# Altium footprint library Master.PcbLib: 178 footprints (part 4 of 12)
Each footprint in its own frame and in the unit in brackets; x right, y up, seen from the top. Pads: shape width x height; smd on the part's side, far side on the other; paste and mask are expansions set on the pad; w line width, h text height; cw(c..) or ccw(c..) is an arc to the next point about the centre after c.
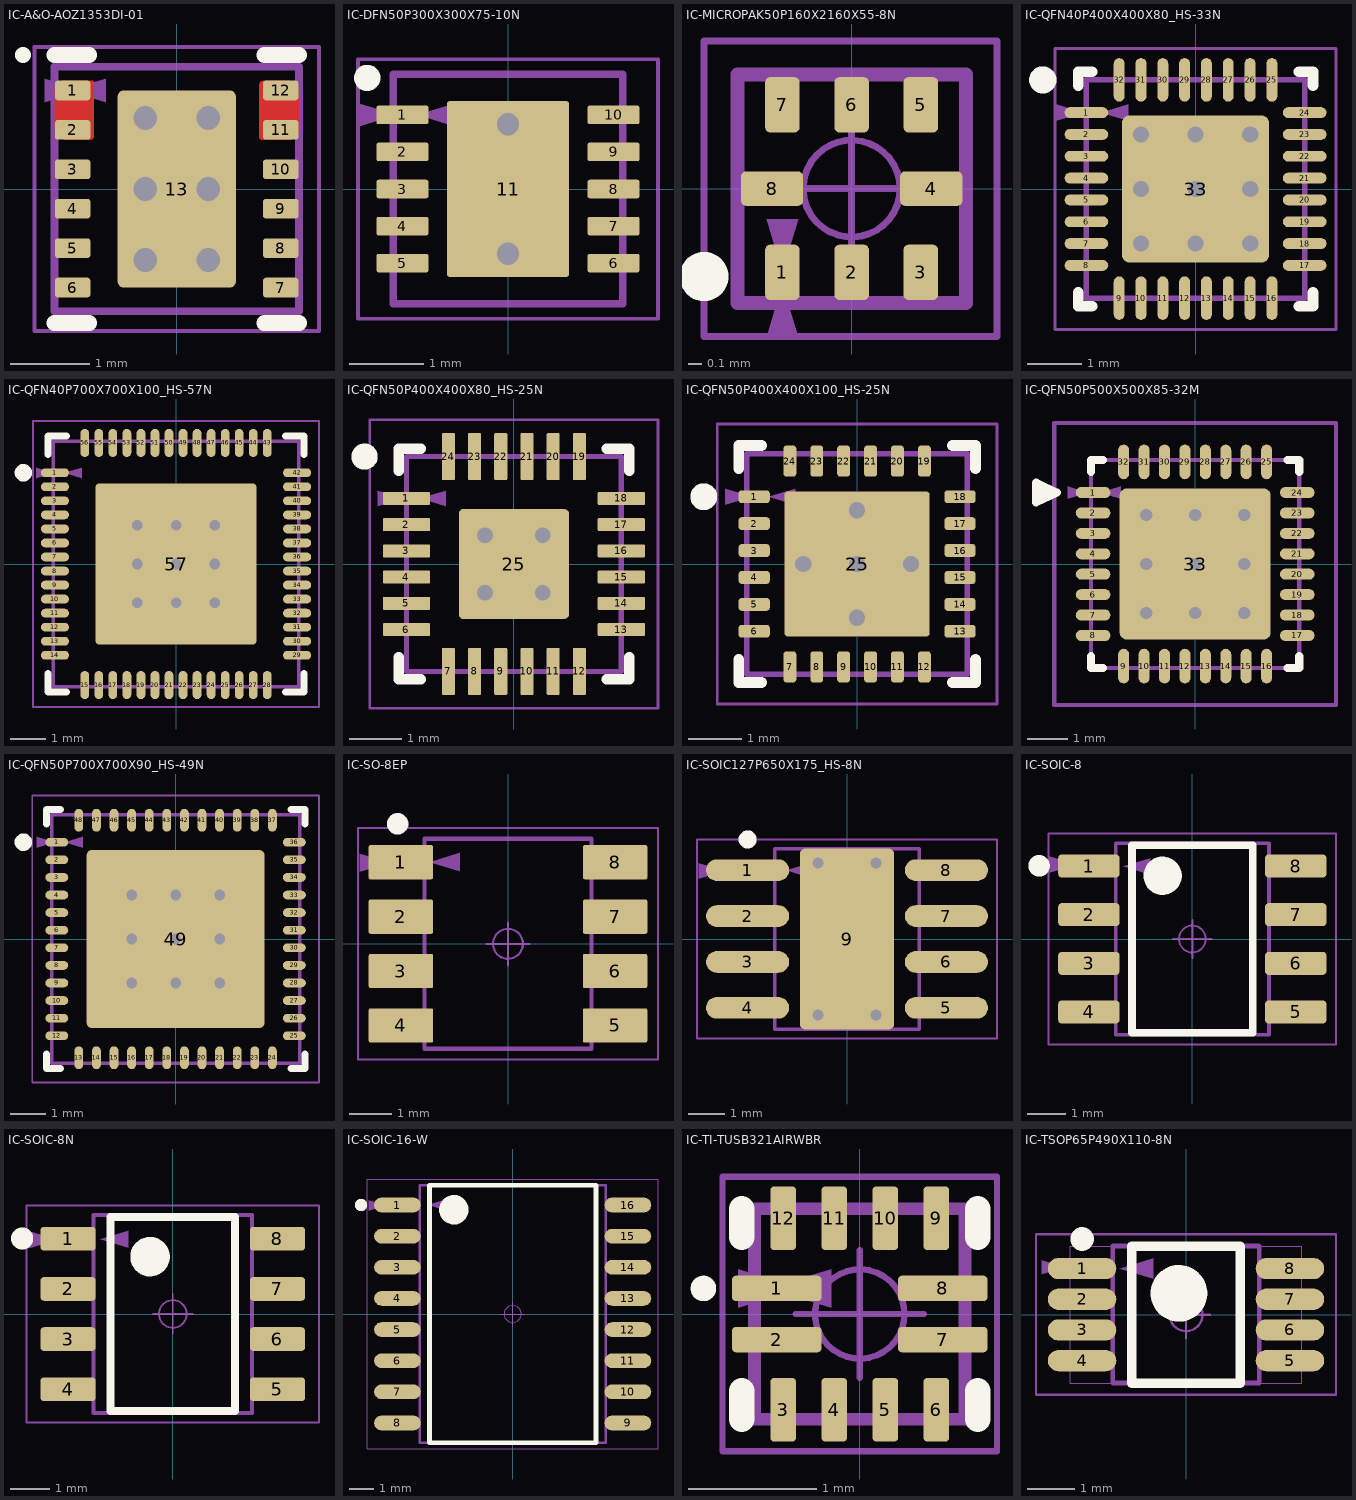
[diagram p3: the footprints below, top view; thin cyan lines are the x and y axes]

## IC-A&O-AOZ1353DI-01 [mm] "PSON, 12-Leads, Body 3.00x3.00mm, Pitch 0.50mm, Thermal Pad 2.50x1.50mm, IPC Medium Density"
height 1
pads (13):
  rrect30% 0.45x0.25 smd mask+0.05: 1(-1.32,1.25) 2(-1.32,0.75) 3(-1.32,0.25) 4(-1.32,-0.25) 5(-1.32,-0.75) 6(-1.32,-1.25) 7(1.32,-1.25) 8(1.32,-0.75) 9(1.32,-0.25) 10(1.32,0.25) 11(1.32,0.75) 12(1.32,1.25)
  rrect10% 1.5x2.5 smd paste-0.75 mask+0.05: 13(0,0)
via 0.4,-0.9 diameter 0.6 hole 0.3
via -0.4,-0.9 diameter 0.6 hole 0.3
via 0.4,0 diameter 0.6 hole 0.3
via -0.4,0 diameter 0.6 hole 0.3
via 0.4,0.9 diameter 0.6 hole 0.3
via -0.4,0.9 diameter 0.6 hole 0.3
Top Layer:
  region: -1.075,1.375 -1.07,1.375 -1.061,1.371 -1.054,1.364 -1.05,1.355 -1.05,1.35 -1.05,0.675 -1.05,0.665 -1.058,0.647 -1.072,0.633 -1.09,0.625 -1.1,0.625 -1.425,0.625 -1.545,0.745 -1.545,1.28 -1.45,1.375
  region: 1.075,0.625 1.07,0.625 1.061,0.629 1.054,0.636 1.05,0.645 1.05,0.65 1.05,1.325 1.05,1.335 1.058,1.353 1.072,1.367 1.09,1.375 1.1,1.375 1.425,1.375 1.545,1.255 1.545,0.72 1.45,0.625
Top Overlay:
  circle w0.1: c-1.95,1.7 r0.05
  lines w0.2: -1.55,-1.7 -1.11,-1.7 ; -1.55,1.7 -1.11,1.7 ; 1.11,-1.7 1.55,-1.7 ; 1.11,1.7 1.55,1.7
Top Paste:
  region: 0.11,0.075 0.126,0.122 0.18,0.204 0.258,0.264 0.351,0.296 0.4,0.3 0.55,0.3 0.55,0.6 0.4,0.6 0.341,0.606 0.233,0.651 0.151,0.733 0.106,0.841 0.1,0.9 0.1,1.05 -0.1,1.05 -0.1,0.9 -0.106,0.841 -0.151,0.733 -0.233,0.651 -0.341,0.606 -0.4,0.6 -0.55,0.6 -0.55,0.3 -0.4,0.3 -0.351,0.296 -0.258,0.264 -0.18,0.204 -0.126,0.122 -0.11,0.075
  region: -0.11,-0.075 -0.126,-0.122 -0.18,-0.204 -0.258,-0.264 -0.351,-0.296 -0.4,-0.3 -0.55,-0.3 -0.55,-0.6 -0.4,-0.6 -0.341,-0.606 -0.233,-0.651 -0.151,-0.733 -0.106,-0.841 -0.1,-0.9 -0.1,-1.05 0.1,-1.05 0.1,-0.9 0.106,-0.841 0.151,-0.733 0.233,-0.651 0.341,-0.606 0.4,-0.6 0.55,-0.6 0.55,-0.3 0.4,-0.3 0.351,-0.296 0.258,-0.264 0.18,-0.204 0.126,-0.122 0.11,-0.075
Top Solder:
  region: 1.595,1.246 1.595,0.674 1.505,0.674 1.406,0.575 1.074,0.575 1.059,0.575 1.032,0.586 1.01,0.607 0.999,0.635 0.999,0.65 0.999,1.325 1,1.346 1.017,1.384 1.048,1.412 1.087,1.426 1.108,1.425 1.416,1.425
  region: -1.595,0.754 -1.595,1.326 -1.505,1.326 -1.406,1.425 -1.074,1.425 -1.059,1.425 -1.031,1.414 -1.01,1.393 -0.999,1.365 -0.999,1.35 -0.999,0.675 -1,0.654 -1.017,0.616 -1.048,0.588 -1.087,0.574 -1.108,0.575 -1.416,0.575
Top Component Outline:
  region: -1.675,1.1 -1.175,1.25 -1.675,1.4
  lines w0.05: -1.805,-1.8 1.805,-1.8 1.805,1.8 -1.805,1.8 -1.805,-1.8
Top 3D Body:
  lines w0.001: -1.551,-1.55 -1.551,1.55 1.551,1.55 1.551,-1.55 -1.551,-1.55
Top Component Center:
  circle w0.05: c0,0 r0.35
  lines w0.05: -0.5,0 0.5,0 ; 0,-0.5 0,0.5
Top Dimensions:
  region: -0.9,1.4 -1.4,1.25 -0.9,1.1
  lines w0.1: -1.55,-1.55 -1.55,1.55 1.55,1.55 1.55,-1.55 -1.55,-1.55
Top Assembly:
  text ".Designator" at -0.5,-0.2 h0.75
3D body "PSON50P300X100_HS-13N.step": height 1, standoff 0, extent -1.551,-1.55 1.551,1.55

## IC-DFN50P300X300X75-10N [mm]
pads (11):
  rrect20% 0.7x0.25 smd: 1(-1.425,1) 2(-1.425,0.5) 3(-1.425,0) 4(-1.425,-0.5) 5(-1.425,-1) 6(1.425,-1) 7(1.425,-0.5) 8(1.425,0) 9(1.425,0.5) 10(1.425,1)
  rrect5% 1.65x2.38 smd paste-2.38: 11(0,0)
via 0,0.875 diameter 0.6 hole 0.3
via 0,-0.875 diameter 0.6 hole 0.3
Top Overlay:
  circle w0.254: c-1.9,1.5 r0.05
Top Paste:
  region: -0.8,0.5 -0.8,0.52 -0.785,0.557 -0.757,0.585 -0.72,0.6 -0.7,0.6 0.7,0.6 0.72,0.6 0.757,0.585 0.785,0.557 0.8,0.52 0.8,0.5 0.8,-0.5 0.8,-0.52 0.785,-0.557 0.757,-0.585 0.72,-0.6 0.7,-0.6 -0.699,-0.6 -0.719,-0.6 -0.756,-0.585 -0.785,-0.557 -0.8,-0.52 -0.8,-0.5
Top Component Outline:
  region: -2,0.85 -1.5,1 -2,1.15
  lines w0.05: -2.025,-1.75 -2.025,1.75 2.025,1.75 2.025,-1.75 -2.025,-1.75
Top 3D Body:
  lines w0.001: -1.551,-1.55 -1.551,1.55 1.551,1.55 1.551,-1.55 -1.551,-1.55
Top Component Center:
  circle w0.05: c0,0 r0.35
  lines w0.05: -0.5,0 0.5,0 ; 0,-0.5 0,0.5
Top Dimensions:
  region: -0.725,1.15 -1.225,1 -0.725,0.85
  lines w0.1: -1.55,-1.55 -1.55,1.55 1.55,1.55 1.55,-1.55 -1.55,-1.55
Top Assembly:
  text ".Designator" at -1.5,2 h0.75
3D body "Test-2.step": height 0.85, standoff 0, extent -1.551,-1.55 1.551,1.55

## IC-MICROPAK50P160X2160X55-8N [mm]
pads (8):
  rrect30% 0.25x0.4 smd: 1(-0.5,-0.605) 2(0,-0.605) 3(0.5,-0.605) 5(0.5,0.605) 6(0,0.605) 7(-0.5,0.605)
  rrect30% 0.45x0.25 smd: 4(0.575,0) 8(-0.575,0)
Top Overlay:
  circle w0.254: c-1.067,-0.635 r0.05
Top Component Outline:
  region: -0.387,-1.073 -0.5,-0.695 -0.613,-1.073
  lines w0.05: -1.067,-1.067 -1.067,1.067 1.05,1.067 1.05,-1.067 -1.067,-1.067
Top 3D Body:
  lines w0.001: -0.825,-0.825 -0.825,0.825 0.825,0.825 0.825,-0.825 -0.825,-0.825
Top Component Center:
  circle w0.05: c0,0 r0.35
  lines w0.05: -0.5,0 0.5,0 ; 0,-0.5 0,0.5
Top Dimensions:
  region: -0.613,-0.222 -0.5,-0.6 -0.387,-0.222
  lines w0.1: -0.825,-0.825 -0.825,0.825 0.825,0.825 0.825,-0.825 -0.825,-0.825
Top Assembly:
  text ".Designator" at -1.7,1.9 h0.75
3D body "PQFN50P160X160X55_HS-9N.step": height 0.55, standoff 0, extent -0.825,-0.825 0.825,0.825

## IC-QFN40P400X400X80_HS-33N [mm]
pads (33):
  oval 0.8x0.2 smd: 1(-2,1.4) 2(-2,1) 3(-2,0.6) 4(-2,0.2) 5(-2,-0.2) 6(-2,-0.6) 7(-2,-1) 8(-2,-1.4) 17(2,-1.4) 18(2,-1) 19(2,-0.6) 20(2,-0.2) 21(2,0.2) 22(2,0.6) 23(2,1) 24(2,1.4)
  oval 0.2x0.8 smd: 9(-1.4,-2) 10(-1,-2) 11(-0.6,-2) 12(-0.2,-2) 13(0.2,-2) 14(0.6,-2) 15(1,-2) 16(1.4,-2) 25(1.4,2) 26(1,2) 27(0.6,2) 28(0.2,2) 29(-0.2,2) 30(-0.6,2) 31(-1,2) 32(-1.4,2)
  rrect10% 2.7x2.7 smd paste-5: 33(0,0)
via 0,-1 diameter 0.6 hole 0.3
via -1,-1 diameter 0.6 hole 0.3
via 1,-1 diameter 0.6 hole 0.3
via 0,0 diameter 0.6 hole 0.3
via -1,0 diameter 0.6 hole 0.3
via 1,0 diameter 0.6 hole 0.3
via 1,1 diameter 0.6 hole 0.3
via -1,1 diameter 0.6 hole 0.3
via 0,1 diameter 0.6 hole 0.3
Top Overlay:
  circle w0.25: c-2.8,2 r0.125
  lines w0.2: -2.15,-1.9 -2.15,-2.15 -1.9,-2.15 ; -2.15,1.9 -2.15,2.15 -1.9,2.15 ; 1.9,-2.15 2.15,-2.15 2.15,-1.9 ; 1.9,2.15 2.15,2.15 2.15,1.9
Top Paste:
  region: 0.7,1 0.706,0.941 0.751,0.833 0.833,0.751 0.941,0.706 1,0.7 1.25,0.7 1.25,0.3 1,0.3 0.961,0.297 0.885,0.277 0.817,0.238 0.762,0.183 0.74,0.15 0.26,0.15 0.249,0.167 0.226,0.198 0.198,0.226 0.167,0.249 0.15,0.26 0.15,0.74 0.183,0.762 0.238,0.817 0.277,0.885 0.297,0.961 0.3,1 0.3,1.25 0.7,1.25
  region: 1,-0.7 0.941,-0.706 0.833,-0.751 0.751,-0.833 0.706,-0.941 0.7,-1 0.7,-1.25 0.3,-1.25 0.3,-1 0.297,-0.961 0.277,-0.885 0.238,-0.817 0.183,-0.762 0.15,-0.74 0.15,-0.26 0.167,-0.249 0.198,-0.226 0.226,-0.198 0.249,-0.167 0.26,-0.15 0.74,-0.15 0.762,-0.183 0.817,-0.238 0.885,-0.277 0.961,-0.297 1,-0.3 1.25,-0.3 1.25,-0.7
  region: -0.7,-1 -0.706,-0.941 -0.751,-0.833 -0.833,-0.751 -0.941,-0.706 -1,-0.7 -1.25,-0.7 -1.25,-0.3 -1,-0.3 -0.961,-0.297 -0.885,-0.277 -0.817,-0.238 -0.762,-0.183 -0.74,-0.15 -0.26,-0.15 -0.249,-0.167 -0.226,-0.198 -0.198,-0.226 -0.167,-0.249 -0.15,-0.26 -0.15,-0.74 -0.183,-0.762 -0.238,-0.817 -0.277,-0.885 -0.297,-0.961 -0.3,-1 -0.3,-1.25 -0.7,-1.25
  region: -1,0.7 -0.941,0.706 -0.833,0.751 -0.751,0.833 -0.706,0.941 -0.7,1 -0.7,1.25 -0.3,1.25 -0.3,1 -0.297,0.961 -0.277,0.885 -0.238,0.817 -0.183,0.762 -0.15,0.74 -0.15,0.26 -0.167,0.249 -0.198,0.226 -0.226,0.198 -0.249,0.167 -0.26,0.15 -0.74,0.15 -0.762,0.183 -0.817,0.238 -0.885,0.277 -0.961,0.297 -1,0.3 -1.25,0.3 -1.25,0.7
Top Component Outline:
  region: -2.55,1.25 -2.05,1.4 -2.55,1.55
  lines w0.05: -2.575,-2.575 -2.575,2.575 2.575,2.575 2.575,-2.575 -2.575,-2.575
  lines w0.1: -0.5,0 0.5,0 ; 0,-0.5 0,0.5
Top 3D Body:
  lines w0.001: -2,-2 -2,2 2,2 2,-2 -2,-2
Top Component Center:
  circle w0.05: c0,0 r0.35
  lines w0.05: -0.5,0 0.5,0 ; 0,-0.5 0,0.5
Top Dimensions:
  region: -1.235,1.55 -1.735,1.4 -1.235,1.25
  lines w0.1: -2,-2 -2,2 2,2 2,-2 -2,-2
Top Assembly:
  text ".Designator" at -1.48,2.843 h0.75
3D body "QFN40P400X400X80_HS-33N.step": height 0.8, standoff 0, extent -2.05,-2.05 2.05,2.05

## IC-QFN40P700X700X100_HS-57N [mm]
pads (57):
  oval 0.8x0.25 smd: 1(-3.45,2.6) 2(-3.45,2.2) 3(-3.45,1.8) 4(-3.45,1.4) 5(-3.45,1) 6(-3.45,0.6) 7(-3.45,0.2) 8(-3.45,-0.2) 9(-3.45,-0.6) 10(-3.45,-1) 11(-3.45,-1.4) 12(-3.45,-1.8) 13(-3.45,-2.2) 14(-3.45,-2.6) 29(3.45,-2.6) 30(3.45,-2.2) 31(3.45,-1.8) 32(3.45,-1.4) 33(3.45,-1) 34(3.45,-0.6) 35(3.45,-0.2) 36(3.45,0.2) 37(3.45,0.6) 38(3.45,1) 39(3.45,1.4) 40(3.45,1.8) 41(3.45,2.2) 42(3.45,2.6)
  oval 0.25x0.8 smd: 15(-2.6,-3.45) 16(-2.2,-3.45) 17(-1.8,-3.45) 18(-1.4,-3.45) 19(-1,-3.45) 20(-0.6,-3.45) 21(-0.2,-3.45) 22(0.2,-3.45) 23(0.6,-3.45) 24(1,-3.45) 25(1.4,-3.45) 26(1.8,-3.45) 27(2.2,-3.45) 28(2.6,-3.45) 43(2.6,3.45) 44(2.2,3.45) 45(1.8,3.45) 46(1.4,3.45) 47(1,3.45) 48(0.6,3.45) 49(0.2,3.45) 50(-0.2,3.45) 51(-0.6,3.45) 52(-1,3.45) 53(-1.4,3.45) 54(-1.8,3.45) 55(-2.2,3.45) 56(-2.6,3.45)
  rrect5% 4.6x4.6 smd paste-10: 57(0,0)
via 1.1,-1.1 diameter 0.6 hole 0.3
via 0,-1.1 diameter 0.6 hole 0.3
via -1.1,-1.1 diameter 0.6 hole 0.3
via 1.1,0 diameter 0.6 hole 0.3
via 0,0 diameter 0.6 hole 0.3
via -1.1,0 diameter 0.6 hole 0.3
via 1.1,1.1 diameter 0.6 hole 0.3
via 0,1.1 diameter 0.6 hole 0.3
via -1.1,1.1 diameter 0.6 hole 0.3
Top Overlay:
  circle w0.25: c-4.35,2.6 r0.125
  lines w0.2: -3.65,-3.125 -3.65,-3.65 -3.125,-3.65 ; -3.65,3.125 -3.65,3.65 -3.125,3.65 ; 3.125,-3.65 3.65,-3.65 3.65,-3.125 ; 3.125,3.65 3.65,3.65 3.65,3.125
Top Paste:
  drawing of 16 lines, arcs and shapes, not listed
Top Component Outline:
  region: -3.99,2.45 -3.49,2.6 -3.99,2.75
  lines w0.05: -4.075,-4.075 -4.075,4.075 4.075,4.075 4.075,-4.075 -4.075,-4.075
Top 3D Body:
  lines w0.001: -3.5,-3.5 -3.5,3.5 3.5,3.5 3.5,-3.5 -3.5,-3.5
Top Component Center:
  circle w0.05: c0,0 r0.35
  lines w0.05: -0.5,0 0.5,0 ; 0,-0.5 0,0.5
Top Dimensions:
  region: -2.685,2.75 -3.185,2.6 -2.685,2.45
  lines w0.1: -3.5,-3.5 -3.5,3.5 3.5,3.5 3.5,-3.5 -3.5,-3.5
Top Assembly:
  text ".Designator" at -1.88,4.293 h0.75
3D body "test-5.step": height 1, standoff 0, extent -3.501,-3.501 3.501,3.501

## IC-QFN50P400X400X80_HS-25N [mm]
pads (25):
  rrect20% 0.9x0.25 smd: 1(-2.05,1.25) 2(-2.05,0.75) 3(-2.05,0.25) 4(-2.05,-0.25) 5(-2.05,-0.75) 6(-2.05,-1.25) 13(2.05,-1.25) 14(2.05,-0.75) 15(2.05,-0.25) 16(2.05,0.25) 17(2.05,0.75) 18(2.05,1.25)
  rrect20% 0.25x0.9 smd: 7(-1.25,-2.05) 8(-0.75,-2.05) 9(-0.25,-2.05) 10(0.25,-2.05) 11(0.75,-2.05) 12(1.25,-2.05) 19(1.25,2.05) 20(0.75,2.05) 21(0.25,2.05) 22(-0.25,2.05) 23(-0.75,2.05) 24(-1.25,2.05)
  rrect8% 2.1x2.1 smd paste-5: 25(0,0)
via -0.55,0.55 diameter 0.6 hole 0.3
via 0.55,0.55 diameter 0.6 hole 0.3
via -0.55,-0.55 diameter 0.6 hole 0.3
via 0.55,-0.55 diameter 0.6 hole 0.3
Top Overlay:
  circle w0.25: c-2.85,2.05 r0.125
  lines w0.2: -2.2,-1.775 -2.2,-2.2 -1.775,-2.2 ; -2.2,1.775 -2.2,2.2 -1.775,2.2 ; 1.775,-2.2 2.2,-2.2 2.2,-1.775 ; 1.775,2.2 2.2,2.2 2.2,1.775
Top Paste:
  region: 0.55,0.25 0.491,0.256 0.383,0.301 0.301,0.383 0.256,0.491 0.25,0.55 0.25,1.05 -0.25,1.05 -0.25,0.55 -0.256,0.491 -0.3,0.383 -0.383,0.3 -0.491,0.256 -0.55,0.25 -1.05,0.25 -1.05,-0.25 -0.55,-0.25 -0.491,-0.256 -0.383,-0.3 -0.3,-0.383 -0.256,-0.491 -0.25,-0.55 -0.25,-1.05 0.25,-1.05 0.25,-0.55 0.256,-0.491 0.301,-0.383 0.383,-0.301 0.491,-0.256 0.55,-0.25 1.05,-0.25 1.05,0.25
Top Component Outline:
  region: -2.603,1.1 -2.103,1.25 -2.603,1.4
  lines w0.05: -2.75,-2.75 -2.75,2.75 2.75,2.75 2.75,-2.75 -2.75,-2.75
Top 3D Body:
  lines w0.001: -2.05,-2.05 2.05,-2.05 2.05,2.05 -2.05,2.05 -2.05,-2.05
Top Component Center:
  circle w0.05: c0,0 r0.35
  lines w0.05: -0.5,0 0.5,0 ; 0,-0.5 0,0.5
Top Dimensions:
  region: -1.298,1.4 -1.798,1.25 -1.298,1.1
  lines w0.1: -2.05,-2.05 -2.05,2.05 2.05,2.05 2.05,-2.05 -2.05,-2.05
Top Assembly:
  text ".Designator" at -1.4,3.025 h0.75
3D body "QFN50P400X400X80_HS-25N.step": height 0.8, standoff 0, extent -2.1,-2.1 2.1,2.1

## IC-QFN50P400X400X100_HS-25N [mm]
pads (25):
  rrect50% 0.58x0.24 smd: 1(-1.913,1.25) 2(-1.913,0.75) 3(-1.913,0.25) 4(-1.913,-0.25) 5(-1.913,-0.75) 6(-1.913,-1.25) 13(1.913,-1.25) 14(1.913,-0.75) 15(1.913,-0.25) 16(1.913,0.25) 17(1.913,0.75) 18(1.913,1.25)
  rrect50% 0.24x0.58 smd: 7(-1.25,-1.913) 8(-0.75,-1.913) 9(-0.25,-1.913) 10(0.25,-1.913) 11(0.75,-1.913) 12(1.25,-1.913) 19(1.25,1.913) 20(0.75,1.913) 21(0.25,1.913) 22(-0.25,1.913) 23(-0.75,1.913) 24(-1.25,1.913)
  rrect5% 2.7x2.7 smd paste-5: 25(0,0)
via 0,0 diameter 0.6 hole 0.3
via 0,1 diameter 0.6 hole 0.3
via 1,0 diameter 0.6 hole 0.3
via -1,0 diameter 0.6 hole 0.3
via 0,-1 diameter 0.6 hole 0.3
Top Overlay:
  circle w0.25: c-2.85,1.25 r0.125
  lines w0.2: -2.2,-1.775 -2.2,-2.2 -1.775,-2.2 ; -2.2,1.775 -2.2,2.2 -1.775,2.2 ; 1.775,-2.2 2.2,-2.2 2.2,-1.775 ; 1.775,2.2 2.2,2.2 2.2,1.775
Top Paste:
  region: -0.26,-0.15 -0.74,-0.15 -0.762,-0.183 -0.817,-0.238 -0.885,-0.277 -0.961,-0.297 -1,-0.3 -1.25,-0.3 -1.25,-1.25 -0.3,-1.25 -0.3,-1 -0.297,-0.961 -0.277,-0.885 -0.238,-0.817 -0.183,-0.762 -0.15,-0.74 -0.15,-0.26 -0.167,-0.249 -0.198,-0.226 -0.226,-0.198 -0.249,-0.167
  region: 0.15,-0.26 0.15,-0.74 0.183,-0.762 0.238,-0.817 0.277,-0.885 0.297,-0.961 0.3,-1 0.3,-1.25 1.25,-1.25 1.25,-0.3 1,-0.3 0.961,-0.297 0.885,-0.277 0.817,-0.238 0.762,-0.183 0.74,-0.15 0.26,-0.15 0.249,-0.167 0.226,-0.198 0.198,-0.226 0.167,-0.249
  region: 0.26,0.15 0.74,0.15 0.762,0.183 0.817,0.238 0.885,0.277 0.961,0.297 1,0.3 1.25,0.3 1.25,1.25 0.3,1.25 0.3,1 0.297,0.961 0.277,0.885 0.238,0.817 0.183,0.762 0.15,0.74 0.15,0.26 0.167,0.249 0.198,0.226 0.226,0.198 0.249,0.167
  region: -0.15,0.26 -0.15,0.74 -0.183,0.762 -0.238,0.817 -0.277,0.885 -0.297,0.961 -0.3,1 -0.3,1.25 -1.25,1.25 -1.25,0.3 -1,0.3 -0.961,0.297 -0.885,0.277 -0.817,0.238 -0.762,0.183 -0.74,0.15 -0.26,0.15 -0.249,0.167 -0.226,0.198 -0.198,0.226 -0.167,0.249
Top Component Outline:
  region: -2.452,1.1 -1.953,1.25 -2.452,1.4
  lines w0.05: -2.6,-2.6 -2.6,2.6 2.6,2.6 2.6,-2.6 -2.6,-2.6
Top 3D Body:
  lines w0.001: -2.05,-2.05 -2.05,2.05 2.05,2.05 2.05,-2.05 -2.05,-2.05
Top Component Center:
  circle w0.05: c0,0 r0.35
  lines w0.05: -0.5,0 0.5,0 ; 0,-0.5 0,0.5
Top Dimensions:
  region: -1.148,1.4 -1.647,1.25 -1.148,1.1
  lines w0.1: -2.05,-2.05 -2.05,2.05 2.05,2.05 2.05,-2.05 -2.05,-2.05
Top Assembly:
  text ".Designator" at -1.702,2.794 h0.75
3D body "test-6.step": height 1, standoff 0, extent -2.051,-2.051 2.051,2.051

## IC-QFN50P500X500X85-32M [mm]
pads (33):
  oval 0.85x0.27 smd: 1(-2.5,1.75) 2(-2.5,1.25) 3(-2.5,0.75) 4(-2.5,0.25) 5(-2.5,-0.25) 6(-2.5,-0.75) 7(-2.5,-1.25) 8(-2.5,-1.75) 17(2.5,-1.75) 18(2.5,-1.25) 19(2.5,-0.75) 20(2.5,-0.25) 21(2.5,0.25) 22(2.5,0.75) 23(2.5,1.25) 24(2.5,1.75)
  oval 0.27x0.85 smd: 9(-1.75,-2.5) 10(-1.25,-2.5) 11(-0.75,-2.5) 12(-0.25,-2.5) 13(0.25,-2.5) 14(0.75,-2.5) 15(1.25,-2.5) 16(1.75,-2.5) 25(1.75,2.5) 26(1.25,2.5) 27(0.75,2.5) 28(0.25,2.5) 29(-0.25,2.5) 30(-0.75,2.5) 31(-1.25,2.5) 32(-1.75,2.5)
  rrect9% 3.7x3.7 smd paste-5: 33(0,0)
via -1.2,1.2 diameter 0.6 hole 0.3
via 0,1.2 diameter 0.6 hole 0.3
via 1.2,1.2 diameter 0.6 hole 0.3
via -1.2,0 diameter 0.6 hole 0.3
via 0,0 diameter 0.6 hole 0.3
via 1.2,0 diameter 0.6 hole 0.3
via -1.2,-1.2 diameter 0.6 hole 0.3
via 0,-1.2 diameter 0.6 hole 0.3
via 1.2,-1.2 diameter 0.6 hole 0.3
Top Overlay:
  rectangle: -3.898,1.63 -3.59,1.858
  lines w0.2: -3.898,1.984 -3.898,1.509 -3.387,1.75 -3.893,1.989 ; -2.55,-2.261 -2.55,-2.55 -2.261,-2.55 ; -2.55,2.261 -2.55,2.55 -2.261,2.55 ; 2.261,-2.55 2.55,-2.55 2.55,-2.261 ; 2.261,2.55 2.55,2.55 2.55,2.261
Top Paste:
  region: 1.2,0.3 1.85,0.3 1.85,0.9 1.2,0.9 1.141,0.906 1.033,0.951 0.951,1.033 0.906,1.141 0.9,1.2 0.9,1.85 0.3,1.85 0.3,1.2 0.297,1.161 0.277,1.085 0.238,1.017 0.183,0.962 0.15,0.94 0.15,0.26 0.167,0.249 0.198,0.226 0.226,0.198 0.249,0.167 0.26,0.15 0.94,0.15 0.962,0.183 1.017,0.238 1.085,0.277 1.161,0.297
  region: 0.3,-1.2 0.3,-1.85 0.9,-1.85 0.9,-1.2 0.906,-1.141 0.951,-1.033 1.033,-0.951 1.141,-0.906 1.2,-0.9 1.85,-0.9 1.85,-0.3 1.2,-0.3 1.161,-0.297 1.085,-0.277 1.017,-0.238 0.962,-0.183 0.94,-0.15 0.26,-0.15 0.249,-0.167 0.226,-0.198 0.198,-0.226 0.167,-0.249 0.15,-0.26 0.15,-0.94 0.183,-0.962 0.238,-1.017 0.277,-1.085 0.297,-1.161
  region: -1.2,-0.3 -1.85,-0.3 -1.85,-0.9 -1.2,-0.9 -1.141,-0.906 -1.033,-0.951 -0.951,-1.033 -0.906,-1.141 -0.9,-1.2 -0.9,-1.85 -0.3,-1.85 -0.3,-1.2 -0.297,-1.161 -0.277,-1.085 -0.238,-1.017 -0.183,-0.962 -0.15,-0.94 -0.15,-0.26 -0.167,-0.249 -0.198,-0.226 -0.226,-0.198 -0.249,-0.167 -0.26,-0.15 -0.94,-0.15 -0.962,-0.183 -1.017,-0.238 -1.085,-0.277 -1.161,-0.297
  region: -0.3,1.2 -0.3,1.85 -0.9,1.85 -0.9,1.2 -0.906,1.141 -0.951,1.033 -1.033,0.951 -1.141,0.906 -1.2,0.9 -1.85,0.9 -1.85,0.3 -1.2,0.3 -1.161,0.297 -1.085,0.277 -1.017,0.238 -0.962,0.183 -0.94,0.15 -0.26,0.15 -0.249,0.167 -0.226,0.198 -0.198,0.226 -0.167,0.249 -0.15,0.26 -0.15,0.94 -0.183,0.962 -0.238,1.017 -0.277,1.085 -0.297,1.161
Top Component Outline:
  region: -3.125,1.6 -2.625,1.75 -3.125,1.9
  lines w0.1: -3.45,-3.45 -3.45,3.45 3.45,3.45 3.45,-3.45 -3.45,-3.45
Top 3D Body:
  lines w0.001: -2.551,-2.551 -2.551,2.551 2.551,2.551 2.551,-2.551 -2.551,-2.551
Top Component Center:
  circle w0.05: c0,0 r0.35
  lines w0.05: -0.5,0 0.5,0 ; 0,-0.5 0,0.5
Top Dimensions:
  region: -1.82,1.9 -2.32,1.75 -1.82,1.6
  lines w0.1: -2.55,-2.55 -2.55,2.55 2.55,2.55 2.55,-2.55 -2.55,-2.55
Top Assembly:
  text ".Designator" at -1.803,3.708 h0.75
3D body "Test-7.step": height 0.85, standoff 0, extent -2.551,-2.551 2.551,2.551

## IC-QFN50P700X700X90_HS-49N [mm]
pads (49):
  oval 0.65x0.25 smd: 1(-3.375,2.75) 2(-3.375,2.25) 3(-3.375,1.75) 4(-3.375,1.25) 5(-3.375,0.75) 6(-3.375,0.25) 7(-3.375,-0.25) 8(-3.375,-0.75) 9(-3.375,-1.25) 10(-3.375,-1.75) 11(-3.375,-2.25) 12(-3.375,-2.75) 25(3.375,-2.75) 26(3.375,-2.25) 27(3.375,-1.75) 28(3.375,-1.25) 29(3.375,-0.75) 30(3.375,-0.25) 31(3.375,0.25) 32(3.375,0.75) 33(3.375,1.25) 34(3.375,1.75) 35(3.375,2.25) 36(3.375,2.75)
  oval 0.25x0.65 smd: 13(-2.75,-3.375) 14(-2.25,-3.375) 15(-1.75,-3.375) 16(-1.25,-3.375) 17(-0.75,-3.375) 18(-0.25,-3.375) 19(0.25,-3.375) 20(0.75,-3.375) 21(1.25,-3.375) 22(1.75,-3.375) 23(2.25,-3.375) 24(2.75,-3.375) 37(2.75,3.375) 38(2.25,3.375) 39(1.75,3.375) 40(1.25,3.375) 41(0.75,3.375) 42(0.25,3.375) 43(-0.25,3.375) 44(-0.75,3.375) 45(-1.25,3.375) 46(-1.75,3.375) 47(-2.25,3.375) 48(-2.75,3.375)
  rrect5% 5.05x5.05 smd paste-5: 49(0,0)
via 1.25,-1.25 diameter 0.6 hole 0.3
via 0,-1.25 diameter 0.6 hole 0.3
via -1.25,-1.25 diameter 0.6 hole 0.3
via 1.25,0 diameter 0.6 hole 0.3
via 0,0 diameter 0.6 hole 0.3
via -1.25,0 diameter 0.6 hole 0.3
via 1.25,1.25 diameter 0.6 hole 0.3
via 0,1.25 diameter 0.6 hole 0.3
via -1.25,1.25 diameter 0.6 hole 0.3
Top Overlay:
  circle w0.25: c-4.325,2.75 r0.125
  lines w0.2: -3.675,-3.275 -3.675,-3.675 -3.275,-3.675 ; -3.675,3.275 -3.675,3.675 -3.275,3.675 ; 3.275,-3.675 3.675,-3.675 3.675,-3.275 ; 3.275,3.675 3.675,3.675 3.675,3.275
Top Paste:
  drawing of 16 lines, arcs and shapes, not listed
Top Component Outline:
  region: -3.95,2.6 -3.45,2.75 -3.95,2.9
  lines w0.05: -4.075,-4.075 4.075,-4.075 4.075,4.075 -4.075,4.075 -4.075,-4.075
Top 3D Body:
  lines w0.001: -3.525,-3.525 3.525,-3.525 3.525,3.525 -3.525,3.525 -3.525,-3.525
Top Component Center:
  circle w0.05: c0,0 r0.35
  lines w0.05: -0.5,0 0.5,0 ; 0,-0.5 0,0.5
Top Dimensions:
  region: -2.645,2.9 -3.145,2.75 -2.645,2.6
  lines w0.1: -3.525,-3.525 3.525,-3.525 3.525,3.525 -3.525,3.525 -3.525,-3.525
Top Assembly:
  text ".Designator" at -1.956,4.267 h0.75
3D body "Test4.step": height 0.9, standoff 0, extent -3.56,-3.56 3.56,3.56

## IC-SO-8EP [mm]
pads (8):
  rrect10% 1.5x0.8 smd: 1(-2.5,1.905) 2(-2.5,0.635) 3(-2.5,-0.635) 4(-2.5,-1.905) 5(2.5,-1.905) 6(2.5,-0.635) 7(2.5,0.635) 8(2.5,1.905)
Top Overlay:
  circle w0.25: c-2.575,2.8 r0.125
Top Component Outline:
  region: -3.455,1.681 -2.745,1.893 -3.455,2.107
  lines w0.05: -3.5,-2.7 -3.5,2.7 3.5,2.7 3.5,-2.7 -3.5,-2.7
Top 3D Body:
  lines w0.001: -1.95,-2.45 1.95,-2.45 1.95,2.45 -1.95,2.45 -1.95,-2.45
Top Component Center:
  circle w0.05: c0,0 r0.35
  lines w0.05: -0.5,0 0.5,0 ; 0,-0.5 0,0.5
Top Dimensions:
  region: -1.12,2.119 -1.83,1.907 -1.12,1.693
  lines w0.1: -1.95,-2.45 1.95,-2.45 1.95,2.45 -1.95,2.45 -1.95,-2.45
Top Assembly:
  text ".Designator" at -1.778,2.972 h0.75
3D body "test2.step": height 1.63, standoff 0, extent -3,-2.5 3,2.5

## IC-SOIC127P650X175_HS-8N [mm]
pads (9):
  oval 2.3x0.6 smd: 1(-2.75,1.905) 2(-2.75,0.635) 3(-2.75,-0.635) 4(-2.75,-1.905) 5(2.75,-1.905) 6(2.75,-0.635) 7(2.75,0.635) 8(2.75,1.905)
  rrect10% 2.6x5 smd paste-5 mask-5: 9(0,0)
via -0.8,2.1 diameter 0.6 hole 0.3
via 0.8,2.1 diameter 0.6 hole 0.3
via -0.8,-2.1 diameter 0.6 hole 0.3
via 0.8,-2.1 diameter 0.6 hole 0.3
Top Overlay:
  circle w0.25: c-2.75,2.755 r0.125
Top Paste:
  rectangle: -1.05,-1.5 1.05,1.5
Top Solder:
  rectangle: -1.3,-1.7 1.3,1.7
Top Component Outline:
  region: -4.105,1.669 -3.395,1.881 -4.105,2.095
  lines w0.05: -4.15,-2.75 -4.15,2.75 4.15,2.75 4.15,-2.75 -4.15,-2.75
Top 3D Body:
  lines w0.01: -2,-2.5 -2,2.5 2,2.5 2,-2.5 -2,-2.5
Top Component Center:
  circle w0.05: c0,0 r0.35
  lines w0.05: -0.5,0 0.5,0 ; 0,-0.5 0,0.5
Top Dimensions:
  region: -0.975,2.113 -1.685,1.9 -0.975,1.687
  lines w0.1: -2,-2.5 2,-2.5 2,2.5 -2,2.5 -2,-2.5
Top Assembly:
  text ".Designator" at -1.778,2.972 h0.75
3D body "test-8.step": height 1.75, standoff 0, extent -3,-2.5 3,2.5

## IC-SOIC-8 [mm] "SOIC-8, 8-Leads, Body 6.19mmx5.00mm, Pitch 1.27mm, IPC Medium Density"
height 1.75
pads (8):
  rrect30% 1.6x0.6 smd: 1(-2.7,1.905) 2(-2.7,0.635) 3(-2.7,-0.635) 4(-2.7,-1.905) 5(2.7,-1.905) 6(2.7,-0.635) 7(2.7,0.635) 8(2.7,1.905)
Top Overlay:
  circle w0.4: c-4,1.91 r0.08
  circle w0.5: c-0.775,1.65 r0.25
  lines w0.2: -1.575,-2.45 1.575,-2.45 1.575,2.45 -1.575,2.45 -1.575,-2.45
Top Component Outline:
  region: -3.73,1.731 -3.02,1.943 -3.73,2.157
  lines w0.05: -3.75,-2.75 3.75,-2.75 3.75,2.75 -3.75,2.75 -3.75,-2.75
Top 3D Body:
  lines w0.001: -2,-2.5 2,-2.5 2,2.5 -2,2.5 -2,-2.5
Top Component Center:
  circle w0.05: c0,0 r0.35
  lines w0.05: -0.5,0 0.5,0 ; 0,-0.5 0,0.5
Top Dimensions:
  region: -1.095,2.106 -1.805,1.894 -1.095,1.68
  lines w0.1: -2,-2.5 2,-2.5 2,2.5 -2,2.5 -2,-2.5
Top Assembly:
  text ".Designator" at -1.803,3.023 h0.75
3D body "test2.step": height 1.63, standoff 0, extent -3,-2.5 3,2.5

## IC-SOIC-8N [mm]
pads (8):
  rrect30% 1.4x0.6 smd: 1(-2.65,1.905) 2(-2.65,0.635) 3(-2.65,-0.635) 4(-2.65,-1.905) 5(2.65,-1.905) 6(2.65,-0.635) 7(2.65,0.635) 8(2.65,1.905)
Top Overlay:
  circle w0.4: c-3.81,1.91 r0.08
  circle w0.5: c-0.575,1.45 r0.25
  lines w0.2: -1.575,-2.45 1.575,-2.45 1.575,2.45 -1.575,2.45 -1.575,-2.45
Top Component Outline:
  region: -3.63,1.669 -2.92,1.881 -3.63,2.095
  lines w0.05: -3.7,-2.75 3.7,-2.75 3.7,2.75 -3.7,2.75 -3.7,-2.75
Top 3D Body:
  lines w0.001: -2,-2.5 2,-2.5 2,2.5 -2,2.5 -2,-2.5
Top Component Center:
  circle w0.05: c0,0 r0.35
  lines w0.05: -0.5,0 0.5,0 ; 0,-0.5 0,0.5
Top Dimensions:
  region: -1.12,2.106 -1.83,1.894 -1.12,1.68
  lines w0.1: -2,-2.5 2,-2.5 2,2.5 -2,2.5 -2,-2.5
Top Assembly:
  text ".Designator" at -1.803,3.023 h0.75
3D body "User Library-SOIC127P500X620X175-8.STEP": height 1.75, standoff 0, extent -3.115,-2.5 3.115,2.5

## IC-SOIC-16-W [mm]
pads (16):
  oval 1.9x0.6 smd: 1(-4.7,4.445) 2(-4.7,3.175) 3(-4.7,1.905) 4(-4.7,0.635) 5(-4.7,-0.635) 6(-4.7,-1.905) 7(-4.7,-3.175) 8(-4.7,-4.445) 9(4.7,-4.445) 10(4.7,-3.175) 11(4.7,-1.905) 12(4.7,-0.635) 13(4.7,0.635) 14(4.7,1.905) 15(4.7,3.175) 16(4.7,4.445)
Top Overlay:
  circle w0.6: c-2.4,4.25 r0.3
  circle w0.25: c-6.185,4.445 r0.125
  lines w0.2: -3.4,-5.25 -3.4,5.25 3.4,5.25 3.4,-5.25 -3.4,-5.25
Top Component Outline:
  region: -5.88,4.219 -5.17,4.431 -5.88,4.645
  lines w0.05: -5.925,-5.5 -5.925,5.5 5.925,5.5 5.925,-5.5 -5.925,-5.5
Top 3D Body:
  lines w0.001: -3.8,-5.25 -3.8,5.25 3.8,5.25 3.8,-5.25 -3.8,-5.25
Top Component Center:
  circle w0.05: c0,0 r0.35
  lines w0.05: -0.5,0 0.5,0 ; 0,-0.5 0,0.5
Top Dimensions:
  region: -2.75,4.663 -3.46,4.45 -2.75,4.237
  lines w0.1: -3.8,-5.25 -3.8,5.25 3.8,5.25 3.8,-5.25 -3.8,-5.25
Top Assembly:
  text ".Designator" at -1.778,5.817 h0.75
3D body "test-9.step": height 2.65, standoff 0, extent -5.15,-5.25 5.15,5.25

## IC-TI-TUSB321AIRWBR [mm]
height 0.4
pads (12):
  rrect30% 0.7x0.2 smd mask+0.05: 1(-0.65,0.2) 2(-0.65,-0.2) 7(0.65,-0.2) 8(0.65,0.2)
  rrect30% 0.2x0.5 smd mask+0.05: 3(-0.6,-0.75) 4(-0.2,-0.75) 5(0.2,-0.75) 6(0.6,-0.75) 9(0.6,0.75) 10(0.2,0.75) 11(-0.2,0.75) 12(-0.6,0.75)
Top Overlay:
  circle w0.1: c-1.225,0.2 r0.05
  lines w0.2: -0.925,-0.825 -0.925,-0.6 ; -0.925,0.6 -0.925,0.825 ; 0.925,-0.825 0.925,-0.6 ; 0.925,0.6 0.925,0.825
Top Component Outline:
  region: -0.95,0.05 -0.45,0.2 -0.95,0.35
  lines w0.05: -1.075,-1.075 1.075,-1.075 1.075,1.075 -1.075,1.075 -1.075,-1.075
Top 3D Body:
  lines w0.001: -0.825,-0.825 0.825,-0.825 0.825,0.825 -0.825,0.825 -0.825,-0.825
Top Component Center:
  circle w0.05: c0,0 r0.35
  lines w0.05: -0.5,0 0.5,0 ; 0,-0.5 0,0.5
Top Dimensions:
  region: -0.225,0.35 -0.725,0.2 -0.225,0.05
  lines w0.1: -0.825,-0.825 0.825,-0.825 0.825,0.825 -0.825,0.825 -0.825,-0.825
Top Assembly:
  text ".Designator" at -0.7,-0.2 h0.75
3D body "IC-TI-TUSB321AIRWBR.step": height 0.4, standoff 0, extent -0.825,-0.825 0.825,0.825

## IC-TSOP65P490X110-8N [mm] "TSOP, 8-Leads, Body 3.00x3.00mm, Pitch 0.65mm, IPC Medium Density"
height 1.1
pads (8):
  oval 1.45x0.45 smd mask+0.102: 1(-2.2,0.975) 2(-2.2,0.325) 3(-2.2,-0.325) 4(-2.2,-0.975) 5(2.2,-0.975) 6(2.2,-0.325) 7(2.2,0.325) 8(2.2,0.975)
Top Overlay:
  circle w0.25: c-2.2,1.6 r0.125
  circle w0.6: c-0.15,0.45 r0.3
  lines w0.2: -1.15,-1.45 -1.15,1.45 1.15,1.45 1.15,-1.45 -1.15,-1.45
Top Component Outline:
  region: -3.05,0.85 -2.55,1 -3.05,1.15
  lines w0.05: -3.175,-1.7 -3.175,1.7 3.175,1.7 3.175,-1.7 -3.175,-1.7
Top 3D Body:
  lines w0.001: -2.45,-1.45 -2.45,1.45 2.45,1.45 2.45,-1.45 -2.45,-1.45
Top Component Center:
  circle w0.05: c0,0 r0.35
  lines w0.05: -0.5,0 0.5,0 ; 0,-0.5 0,0.5
Top Dimensions:
  region: -0.69,1.188 -1.4,0.975 -0.69,0.762
  lines w0.1: -1.55,-1.45 1.55,-1.45 1.55,1.45 -1.55,1.45 -1.55,-1.45
Top Assembly:
  text ".Designator" at -1.689,-0.17 h0.75
3D body "TSOP65P490X110-8N.step": height 1.1, standoff 0, extent -2.45,-1.45 2.45,1.45